# Altium schematic symbol library Electrode_35x25_4x5_D2.SchLib: 6 symbols
Pins are listed as number, name and electrical type; pins without a type are passive.

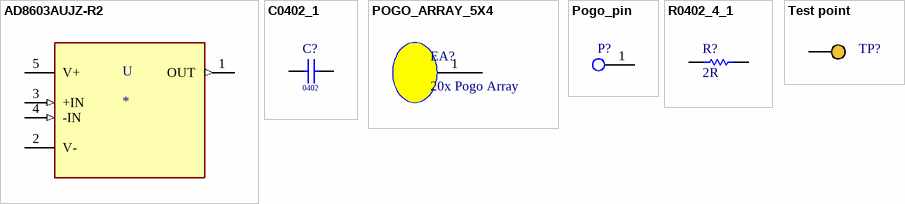
[diagram p0: symbols AD8603AUJZ-R2 to Test point]

## AD8603AUJZ-R2
designator U
General Purpose Amplifier 1 Circuit Rail-to-Rail TSOT-5; MP: AD8603AUJZ-R2; MF: Analog Devices; Value: *; Availability: Unavailable; Price: None; Package: TSOT-5 Analog Devices; SnapEDA_Link: https://www.snapeda.com/parts/AD8603AUJZ-R2/Analog%20Devices/view-part/574456/?ref=snap
footprint SOT95P280X100-5N
pins: 1 OUT (out), 2 V- (power), 3 +IN (in), 4 -IN (in), 5 V+ (power)

## C0402_1
designator C?  Case: 0402
CAP 0402 100nF 16V Y5V; MPN: CL05B104KO5NNNC; Manu: Samsung Electro-Mechanics; Comment Description: Cap 0.1uF 16V 0402; Type: Capacitor; Value1: 0.1uF; Value2: 16V
footprint C0402L
footprint C0402L
pins: 1, 2

## POGO_ARRAY_5X4
designator EA?, comment 20x Pogo Array
footprint POGO_ARRAY_5X4_D2P0_H5P5
pins: 1 POGO_RAW

## Pogo_pin
designator P?
footprint PogoPad
pins: 1

## R0402_4_1
designator R?, comment 2R
MPN: FRC0603J2R0 TS; Value2: 100mW; Comment Description: 2Ω ±5% 100mW 0603 Thick Film Resistor; Manu: FOJAN; Value1: 2R; Case: 0603; Type: Resistor
footprint R0603L
footprint R0402L
pins: 1, 2

## Test point
designator TP?, comment N/A  (value not drawn)  (no BOM)
Test point; Value1: N/A; Value2: N/A
footprint TESTPOINT 1.2MM
footprint TESTPOINT 1.5MM
footprint Hole 1.1MM
footprint TESTPOINT 0.8mm
footprint TESTPOINT 1.6mm
footprint TESTPOINT 1.2MM
pins: 1